# Altium schematic symbol library adl5960.SchLib: 1 symbol
Pins are listed as number, name and electrical type; pins without a type are passive.

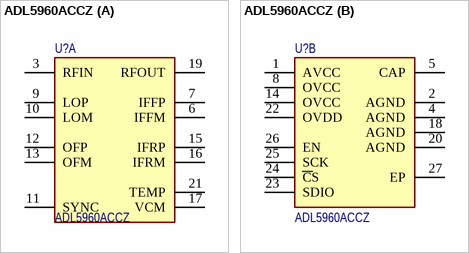
[diagram p0: symbol ADL5960ACCZ]

## ADL5960ACCZ
designator U?
10 MHz to 20 GHz Integrated Vector Network Analyzer Front End; Manufacturer: Analog Devices; Manufacturer Lifecycle Status: PRODUCTION; Supplier: Farnell; Supplier Part Number: ADL5960ACCZ; Manufacturer Part Number: ADL5960ACCZ; Category: Uncategorized; Stock: 30; Lifecycle Status: Production; ComponentLink1URL: https://octopart.com:443/opatz8j6/c1?t=sNn__E9if7phYpKIGt1HGors_3fkiZxAOk72fyHCpcdGdEVv4rI4oJjph59vRY8RkB2W6v6FUDb5vdq2LBbZOBejgV7lxPf1byVkt5o1bTHGBtKKZ6Tb3MUQ4F5jve5jIWWR5DzlCFF3u66MTO-qwqQC24WdVR_dh-itx28DAXgluqoEWVUgxFMfBbjVdfTk_KnL56IoFFq5EsB3mzvz68whwf5lUIDgQKXuAkuEH9EekJ4yxnZRnlukBpMqeuNE75q6lyql7jt9fMK9L5vifS7jSQ0phH-iyEfXCpMlEKgYs4T2ZLlJAKc&src-supplier=Analog+Devices; ComponentLink1Description: https://octopart.com:443/opatz8j6/c1?t=sNn__E9if7phYpKIGt1HGors_3fkiZxAOk72fyHCpcdGdEVv4rI4oJjph59vRY8RkB2W6v6FUDb5vdq2LBbZOBejgV7lxPf1byVkt5o1bTHGBtKKZ6Tb3MUQ4F5jve5jIWWR5DzlCFF3u66MTO-qwqQC24WdVR_dh-itx28DAXgluqoEWVUgxFMfBbjVdfTk_KnL56IoFFq5EsB3mzvz68whwf5lUIDgQKXuAkuEH9EekJ4yxnZRnlukBpMqeuNE75q6lyql7jt9fMK9L5vifS7jSQ0phH-iyEfXCpMlEKgYs4T2ZLlJAKc&src-supplier=Analog+Devices; ComponentLink2URL: http://sigma.octopart.com:80/conflict_mineral_statement/Analog-Devices-company-33.pdf?src-supplier=Compliance+Statements; ComponentLink2Description: http://sigma.octopart.com:80/conflict_mineral_statement/Analog-Devices-company-33.pdf?src-supplier=Compliance+Statements; ComponentLink3URL: https://octopart.com:443/opatz8j6/c1?t=wHYJiqXauK4GQM2tQ_zDqUa69f3N-5zA8TKZKGG1nxLidXH63u1cM0l-QN9E_93qqH5iv-1ZwJaGS180fzg_5Oe7Zc70L6wz2jI3y8w5lOGbgZyt_6NHhOm9jFHXaC4goDV5tsi3ZeeHrBwAQ6jdg7bzlT8NTI2okqPMewkI4fW6NGQpSGyHBCKZ0RyHdS3IP7gHGcc2ag_P3vSw00v3vkIXauamRiOkOWDHR5I_2w_ejY6bXPncjy1qH_sL9J1lP9Udtz3B5do7UwqucEogziSC9qVfJGWqMtIPTtJ4546mLJoeyxvlv0E&src-supplier=Compliance+Statements; ComponentLink3Description: https://octopart.com:443/opatz8j6/c1?t=wHYJiqXauK4GQM2tQ_zDqUa69f3N-5zA8TKZKGG1nxLidXH63u1cM0l-QN9E_93qqH5iv-1ZwJaGS180fzg_5Oe7Zc70L6wz2jI3y8w5lOGbgZyt_6NHhOm9jFHXaC4goDV5tsi3ZeeHrBwAQ6jdg7bzlT8NTI2okqPMewkI4fW6NGQpSGyHBCKZ0RyHdS3IP7gHGcc2ag_P3vSw00v3vkIXauamRiOkOWDHR5I_2w_ejY6bXPncjy1qH_sL9J1lP9Udtz3B5do7UwqucEogziSC9qVfJGWqMtIPTtJ4546mLJoeyxvlv0E&src-supplier=Compliance+Statements; Supplier 1: Farnell; Supplier Part Number 1: ADL5960ACCZ
footprint ADL5960ACCZ (LGA, 26-Leads, Body 3.00x4.00mmx0.78mm)
part A pins: 3 RFIN, 6 IFFM, 7 IFFP, 9 LOP, 10 LOM, 11 SYNC, 12 OFP, 13 OFM, 15 IFRP, 16 IFRM, 17 VCM, 19 RFOUT, 21 TEMP
part B pins: 1 AVCC, 2 AGND, 4 AGND, 5 CAP, 8 OVCC, 14 OVCC, 18 AGND, 20 AGND, 22 OVDD, 23 SDIO, 24 CS, 25 SCK, 26 EN, 27 EP